# Altium footprint library 未分类IC.PcbLib: 46 footprints (part 1 of 3)
Each footprint in its own frame and in the unit in brackets; x right, y up, seen from the top. Pads: shape width x height; smd on the part's side, far side on the other; paste and mask are expansions set on the pad; w line width, h text height; cw(c..) or ccw(c..) is an arc to the next point about the centre after c.
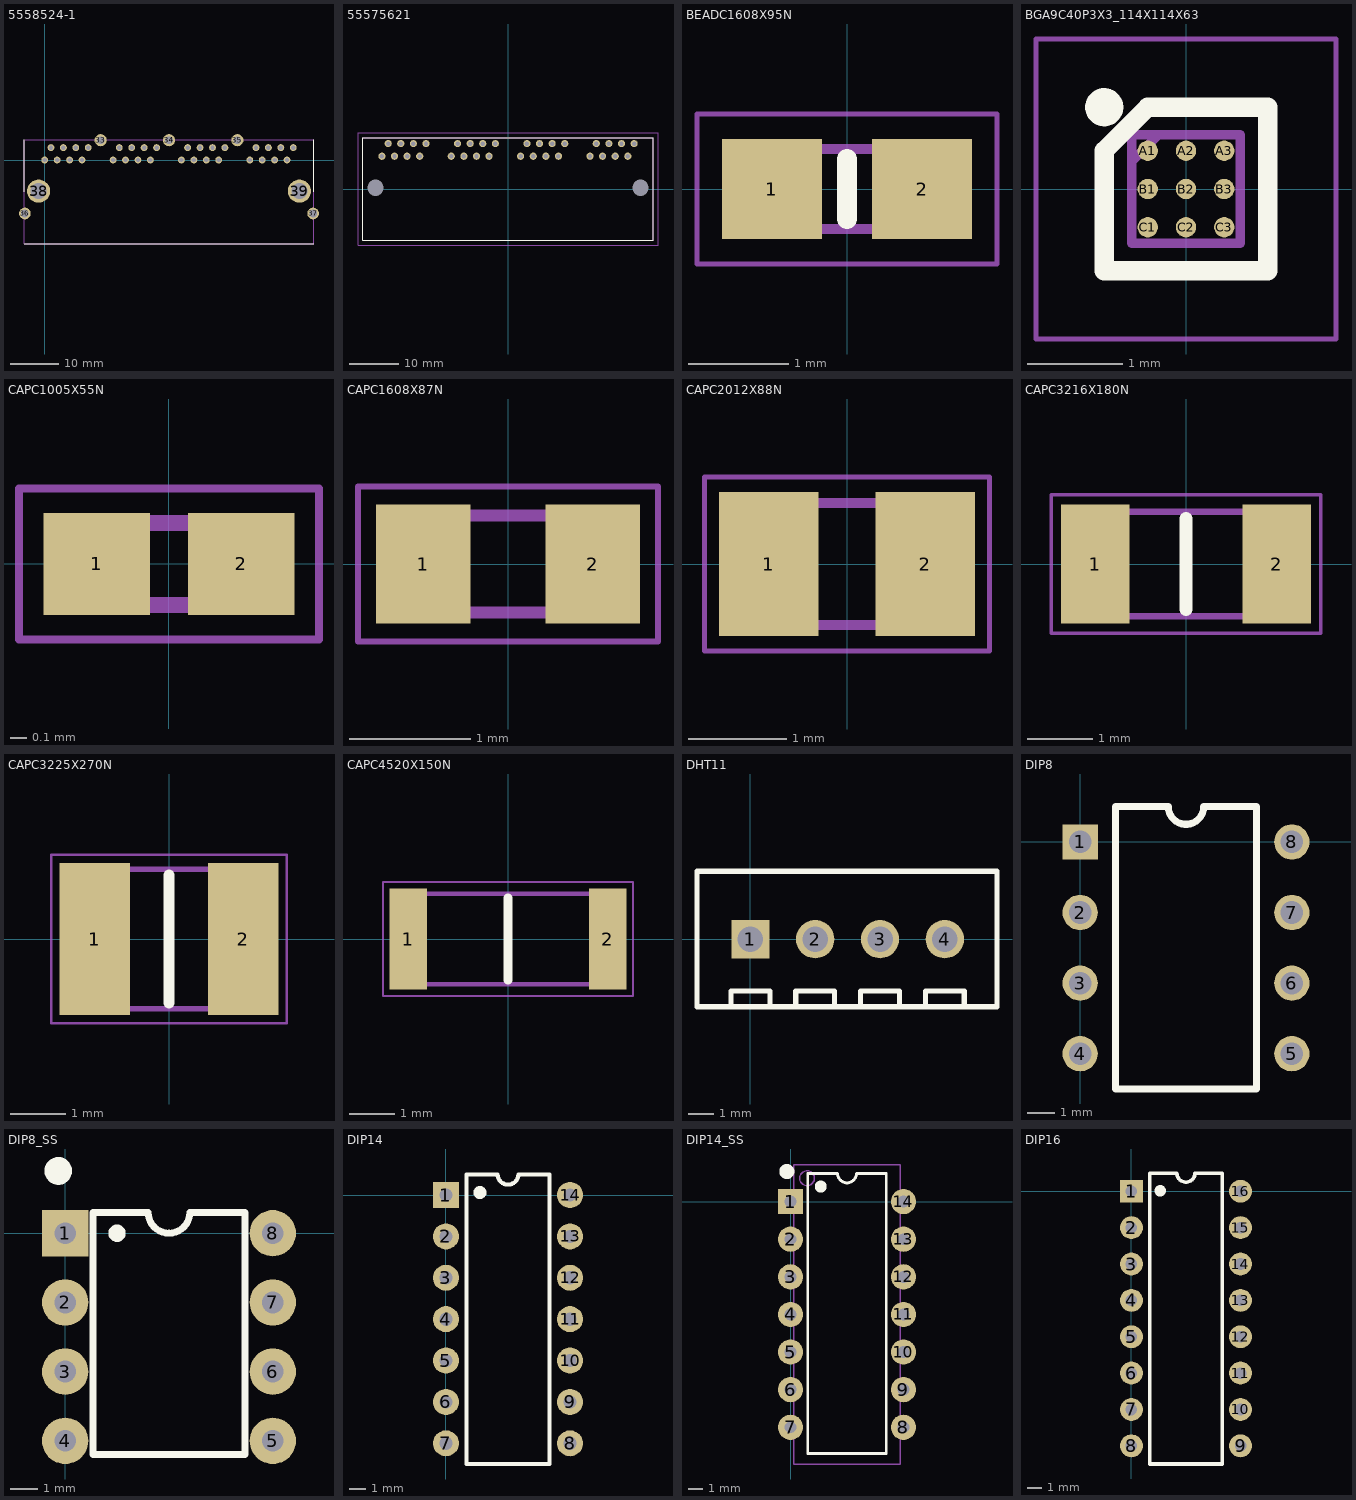
[diagram p0: the footprints below, top view; thin cyan lines are the x and y axes]

## 5558524-1 [mm]
pads (39):
  round 1.4 hole 0.89: 1(0,0) 2(1.27,2.54) 3(2.54,0) 4(3.81,2.54) 5(5.08,0) 6(6.35,2.54) 7(7.62,0) 8(8.89,2.54) 9(13.97,0) 10(15.24,2.54) 11(16.51,0) 12(17.78,2.54) 13(19.05,0) 14(20.32,2.54) 15(21.59,0) 16(22.86,2.54) 17(27.94,0) 18(29.21,2.54) 19(30.48,0) 20(31.75,2.54) 21(33.02,0) 22(34.29,2.54) 23(35.56,0) 24(36.83,2.54) 25(41.91,0) 26(43.18,2.54) 27(44.45,0) 28(45.72,2.54) 29(46.99,0) 30(48.26,2.54) 31(49.53,0) 32(50.8,2.54)
  round 2.5 hole 1.57: 33(11.43,4.06) 34(25.4,4.06) 35(39.37,4.06)
  round 2.4 hole 1.57: 36(-4.06,-10.92) 37(54.86,-10.92)
  round 4.75 hole 3.25: 38(-1.27,-6.35) 39(52.07,-6.35)
Top Overlay:
  lines w0.2: -4.19,-17.15 54.99,-17.15 ; -4.19,-6.48 -4.19,4.19 ; 54.99,-6.48 54.99,4.19
Mechanical 13:
  lines w0.2: -4.19,-17.15 -4.19,4.19 54.99,4.19 54.99,-17.15 -4.19,-17.15
3D body "5558524-1.stp": height 14.9, standoff -3.83, extent -4.186,-17.145 54.986,4.191

## 55575621 [mil]
pads (34):
  round 56.88 hole 35: 1(-1000,260) 2(-950,360) 3(-900,260) 4(-850,360) 5(-800,260) 6(-750,360) 7(-700,260) 8(-650,360) 9(-450,260) 10(-400,360) 11(-350,260) 12(-300,360) 13(-250,260) 14(-200,360) 15(-150,260) 16(-100,360) 17(100,260) 18(150,360) 19(200,260) 20(250,360) 21(300,260) 22(350,360) 23(400,260) 24(450,360) 25(650,260) 26(700,360) 27(750,260) 28(800,360) 29(850,260) 30(900,360) 31(950,260) 32(1000,360)
  round 64 hole 127.99 unplated: 33(-1050,10) 34(1050,10)
Top Overlay:
  lines w3.94: -1150,-405 -1150,405 1150,405 1150,-405 -1150,-405
Mechanical 13:
  lines w7.87: -1150,-405 -1150,405 1150,405 1150,-405 -1150,-405
Mechanical 15:
  lines w3.94: -1189.37,-444.37 -1189.37,444.37 1189.37,444.37 1189.37,-444.37 -1189.37,-444.37
3D body "5557562-1.stp": height 511.81, standoff -196.85, extent -1150,-405 1150,405

## BEADC1608X95N [mm]
pads (2):
  rect 1x1 smd: 1(-0.75,0) 2(0.75,0)
Top Overlay:
  lines w0.2: 0,-0.3 0,0.3
Mechanical 13:
  lines w0.1: -0.8,-0.4 0.8,-0.4 0.8,0.4 -0.8,0.4 -0.8,-0.4
Mechanical 15:
  lines w0.05: -1.5,-0.75 1.5,-0.75 1.5,0.75 -1.5,0.75 -1.5,-0.75
3D body "BLM18PG121SZ1D.stp": height 0.95, standoff 0, extent -0.8,-0.4 0.8,0.4

## BGA9C40P3X3_114X114X63 [mm]
pads (9):
  round 0.212 smd: A1(-0.4,0.4) A2(0,0.4) A3(0.4,0.4) B1(-0.4,0) B2(0,0) B3(0.4,0) C1(-0.4,-0.4) C2(0,-0.4) C3(0.4,-0.4)
Top Overlay:
  circle w0.2: c-0.856,0.856 r0.1
  lines w0.2: -0.856,-0.856 0.856,-0.856 0.856,0.856 -0.4,0.856 -0.856,0.4 -0.856,-0.856
Mechanical 13:
  lines w0.1: -0.57,0.285 -0.285,0.57 ; -0.57,-0.57 0.57,-0.57 0.57,0.57 -0.57,0.57 -0.57,-0.57
Mechanical 15:
  lines w0.05: -1.57,-1.57 1.57,-1.57 1.57,1.57 -1.57,1.57 -1.57,-1.57
3D body "ESD5384NCTBG.stp": height 0.63, standoff 0, extent -0.57,-0.57 0.57,0.57

## CAPC1005X55N [mm]
pads (2):
  rect 0.65x0.62 smd: 1(-0.44,0) 2(0.44,0)
Mechanical 13:
  lines w0.1: -0.5,-0.25 -0.5,0.25 0.5,0.25 0.5,-0.25 -0.5,-0.25
Mechanical 15:
  lines w0.05: -0.915,-0.46 -0.915,0.46 0.915,0.46 0.915,-0.46 -0.915,-0.46
3D body "C0402C100C5GAC.stp": height 0.55, standoff 0, extent -0.5,-0.25 0.5,0.25

## CAPC1608X87N [mm]
pads (2):
  rect 0.78x0.98 smd: 1(-0.7,0) 2(0.7,0)
Mechanical 13:
  lines w0.1: -0.8,-0.4 0.8,-0.4 0.8,0.4 -0.8,0.4 -0.8,-0.4
Mechanical 15:
  lines w0.05: -1.24,-0.64 1.24,-0.64 1.24,0.64 -1.24,0.64 -1.24,-0.64
3D body "C0603C100C3GACTU.stp": height 0.87, standoff 0, extent -0.8,-0.4 0.8,0.4

## CAPC2012X88N [mm]
pads (2):
  rect 1.02x1.47 smd: 1(-0.8,0) 2(0.8,0)
Mechanical 13:
  lines w0.1: -1,-0.625 -1,0.625 1,0.625 1,-0.625 -1,-0.625
Mechanical 15:
  lines w0.05: -1.46,-0.89 -1.46,0.89 1.46,0.89 1.46,-0.89 -1.46,-0.89
3D body "C0805C100J5GACTU.stp": height 0.88, standoff 0, extent -1,-0.625 1,0.625

## CAPC3216X180N [mm]
pads (2):
  rect 1.05x1.82 smd: 1(-1.39,0) 2(1.39,0)
Top Overlay:
  lines w0.2: 0,-0.7 0,0.7
Mechanical 13:
  lines w0.1: -1.6,-0.8 1.6,-0.8 1.6,0.8 -1.6,0.8 -1.6,-0.8
Mechanical 15:
  lines w0.05: -2.065,-1.06 2.065,-1.06 2.065,1.06 -2.065,1.06 -2.065,-1.06
3D body "CL31B106KAHNNNE.stp": height 1.8, standoff 0, extent -1.6,-0.8 1.6,0.8

## CAPC3225X270N [mm]
pads (2):
  rect 1.26x2.72 smd: 1(-1.33,0) 2(1.33,0)
Top Overlay:
  lines w0.2: 0,-1.15 0,1.15
Mechanical 13:
  lines w0.1: -1.6,-1.25 1.6,-1.25 1.6,1.25 -1.6,1.25 -1.6,-1.25
Mechanical 15:
  lines w0.05: -2.11,-1.51 2.11,-1.51 2.11,1.51 -2.11,1.51 -2.11,-1.51
3D body "GRM32ER61C476KE15L.stp": height 2.7, standoff 0, extent -1.6,-1.25 1.6,1.25

## CAPC4520X150N [mm]
pads (2):
  rect 0.82x2.22 smd: 1(-2.2,0) 2(2.2,0)
Top Overlay:
  lines w0.2: 0,-0.9 0,0.9
Mechanical 13:
  lines w0.1: -2.25,-1 -2.25,1 2.25,1 2.25,-1 -2.25,-1
Mechanical 15:
  lines w0.05: -2.76,-1.26 -2.76,1.26 2.76,1.26 2.76,-1.26 -2.76,-1.26
3D body "GR442QR73D102KW01L.stp": height 1.5, standoff 0, extent -2.25,-1 2.25,1

## DHT11 [mm]
pads (4):
  rect 1.5x1.5 hole 1: 1(0,0)
  round 1.5 hole 1: 2(2.54,0) 3(5.08,0) 4(7.62,0)
Top Overlay:
  lines w0.203: -0.762,-2.648 -0.762,-2.032 0.762,-2.032 0.762,-2.648 ; 1.778,-2.648 1.778,-2.032 3.302,-2.032 3.302,-2.54 ; 4.318,-2.648 4.318,-2.032 5.842,-2.032 5.842,-2.54 ; 6.858,-2.648 6.858,-2.032 8.382,-2.032 8.382,-2.54 ; -2.094,-2.648 -2.094,2.66 9.666,2.66 9.666,-2.648 -2.094,-2.648
3D body "User Library-DHT11.STEP": height 15.5, standoff -8, extent -2.221,-2.75 9.779,2.75

## DIP8 [mil]
pads (8):
  rect 50x50 hole 32: 1(0,0)
  round 50 hole 32: 2(0,-100) 3(0,-200) 4(0,-300) 5(300,-300) 6(300,-200) 7(300,-100) 8(300,0)
Top Overlay:
  lines w10: 50,-350 50,50 125,50 ccw(c150,50) 175,50 250,50 250,-350 50,-350
3D body "DIP8.STEP": height 200, standoff -137.8, extent -4.92,-359.96 304.92,69.96

## DIP8_SS [mm] "DIP8-SMD Socket"
pads (8):
  rect 1.7x1.7 hole 0.8: 1(0,0)
  round 1.7 hole 0.8: 2(0,-2.54) 3(0,-5.08) 4(0,-7.62) 5(7.62,-7.62) 6(7.62,-5.08) 7(7.62,-2.54) 8(7.62,0)
Top Overlay:
  circle w0.508: c-0.254,2.286 r0.254
  circle w0.381: c1.905,0 r0.127
  lines w0.254: 1.016,-8.128 6.604,-8.128 6.604,0.762 4.572,0.762 cw(c3.81,0.762) 3.81,0 cw(c3.81,0.762) 3.048,0.762 1.016,0.762 1.016,-8.128
3D body "DIP-MH8-300.STEP": height 4.95, standoff -2.95, extent -1.19,-9 8.81,1.38
3D body "DIP8-300.STEP": height 7.7, standoff 0, extent -0.115,-8.51 7.735,0.89

## DIP14 [mm]
pads (14):
  rect 1.6x1.6 hole 0.813: 1(0,0)
  round 1.6 hole 0.813: 2(0,-2.54) 3(0,-5.08) 4(0,-7.62) 5(0,-10.16) 6(0,-12.7) 7(0,-15.24) 8(7.62,-15.24) 9(7.62,-12.7) 10(7.62,-10.16) 11(7.62,-7.62) 12(7.62,-5.08) 13(7.62,-2.54) 14(7.62,0)
Top Overlay:
  circle w0.5: c2.085,0.155 r0.15
  lines w0.254: 1.27,-16.51 1.27,1.27 3.175,1.27 ccw(c3.81,1.27) 4.445,1.27 6.35,1.27 6.35,-16.51 1.27,-16.51
3D body "DIP14.STEP": height 5.1, standoff -3.3, extent -0.25,-17.62 7.62,2.38

## DIP14_SS [mm] "DIP14-SMD Socket"
pads (14):
  rect 1.7x1.7 hole 0.8: 1(0,0)
  round 1.7 hole 0.8: 2(0,-2.54) 3(0,-5.08) 4(0,-7.62) 5(0,-10.16) 6(0,-12.7) 7(0,-15.24) 8(7.62,-15.24) 9(7.62,-12.7) 10(7.62,-10.16) 11(7.62,-7.62) 12(7.62,-5.08) 13(7.62,-2.54) 14(7.62,0)
Top Overlay:
  circle w0.6: c2.032,1.016 r0.1
  circle w0.508: c-0.254,2.032 r0.254
  lines w0.2: 1.16,-17.018 1.16,1.905 3.175,1.905 ccw(c3.81,1.905) 4.445,1.905 6.46,1.905 6.46,-17.018 1.16,-17.018
Mechanical 13:
  circle w0.1: c1.11,1.58 r0.5
  lines w0.1: 0.21,-17.72 0.21,2.48 7.41,2.48 7.41,-17.72 0.21,-17.72
3D body "DIP14-300.STEP": height 7.15, standoff -0.3, extent -0.17,-17.12 7.79,1.88
3D body "DIP-MH14-300.STEP": height 4.95, standoff -2.95, extent -1.19,-16.62 8.81,1.38

## DIP16 [mm]
pads (16):
  rect 1.6x1.6 hole 0.813: 1(0,0)
  round 1.6 hole 0.813: 2(0,-2.54) 3(0,-5.08) 4(0,-7.62) 5(0,-10.16) 6(0,-12.7) 7(0,-15.24) 8(0,-17.78) 9(7.627,-17.78) 10(7.62,-15.24) 11(7.62,-12.7) 12(7.62,-10.16) 13(7.62,-7.62) 14(7.62,-5.08) 15(7.62,-2.54) 16(7.62,0)
Top Overlay:
  circle w0.5: c2.014,0.035 r0.15
  lines w0.254: 1.27,-19.05 6.35,-19.05 6.35,1.27 4.445,1.27 cw(c3.81,1.27) 3.175,1.27 1.27,1.27 1.27,-19.05
3D body "DIP16.STEP": height 5.1, standoff -3.3, extent -0.119,-18.763 7.751,1.237